# Altium schematic symbol library LM317MSTT3G.SchLib: 1 symbol
Pins are listed as number, name and electrical type; pins without a type are passive.

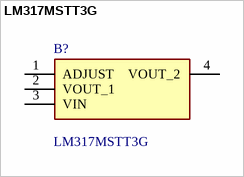
[diagram p0: symbol LM317MSTT3G]

## LM317MSTT3G
designator B?
Internal Short Circuit Current Limiting; Internal Thermal Overload Protection; Output Current in Excess of 500 mA; Output Transistor Safe-Area Compensation; Output Adjustable between 1.2 V and 37 V; Floating Operation for High Voltage Applications; Eliminates Stocking Many Fixed Voltages; Pb-Free Packages are Available; NCV Prefix for Automotive and Other Applications Requiring Site Control Changes; Manufacturer_Name: onsemi; Geometry.Height: 1.75mm; Mouser Part Number: 863-LM317MSTT3G; Mouser Price/Stock: https://www.mouser.co.uk/ProductDetail/onsemi/LM317MSTT3G?qs=2OtswVQKCOFpDo6oeYvGzw%3D%3D; Manufacturer_Part_Number: LM317MSTT3G; Datasheet Link: https://www.onsemi.com/pub/Collateral/LM317M-D.PDF
footprint SOT230P700X175-4N
pins: 1 ADJUST, 2 VOUT_1, 3 VIN, 4 VOUT_2